# Altium footprint library EG1206.PCBLIB: 1 footprints
Each footprint in its own frame and in the unit in brackets; x right, y up, seen from the top. Pads: shape width x height; smd on the part's side, far side on the other; paste and mask are expansions set on the pad; w line width, h text height; cw(c..) or ccw(c..) is an arc to the next point about the centre after c.
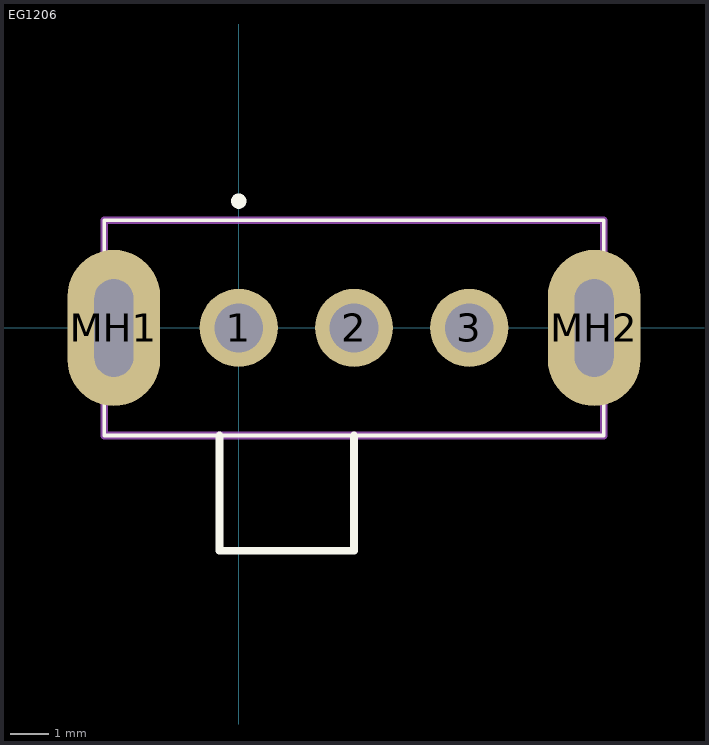
[diagram p0: the footprint, top view; thin cyan lines are the x and y axes]

## EG1206 [mil]
pads (5):
  round 80 hole 50: 1(0,0) 2(118.11,0) 3(236.22,0)
  oval 95x160 hole 100 slot 40 at 0 deg: MH1(-127.95,0) MH2(364.17,0)
Top Overlay:
  lines w3.94: -137.8,-78.74 -137.8,-110.24 374.02,-110.24 374.02,-78.74 ; -137.8,78.74 -137.8,110.24 374.02,110.24 374.02,78.74
  lines w7.87: -19.69,-110.24 -19.69,-228.35 118.11,-228.35 118.11,-110.24 ; -3.94,129.92 cw(c0,129.92) 3.94,129.92 cw(c0,129.92) -3.94,129.92
Mechanical 13:
  lines w7.87: -137.8,-110.24 374.02,-110.24 ; -137.8,110.24 374.02,110.24
  lines w8: -137.8,-110.24 -137.8,110.24 ; 374.02,-110.24 374.02,110.24
3D body "EG1206.step": height 200.7, standoff -147.53, extent -137.27,-291.73 377.27,125